# Altium footprint library Terminal_Blocks_Pluggable PCB_5.08mm.PcbLib: 299 footprints (part 9 of 19)
Each footprint in its own frame and in the unit in brackets; x right, y up, seen from the top. Pads: shape width x height; smd on the part's side, far side on the other; paste and mask are expansions set on the pad; w line width, h text height; cw(c..) or ccw(c..) is an arc to the next point about the centre after c.
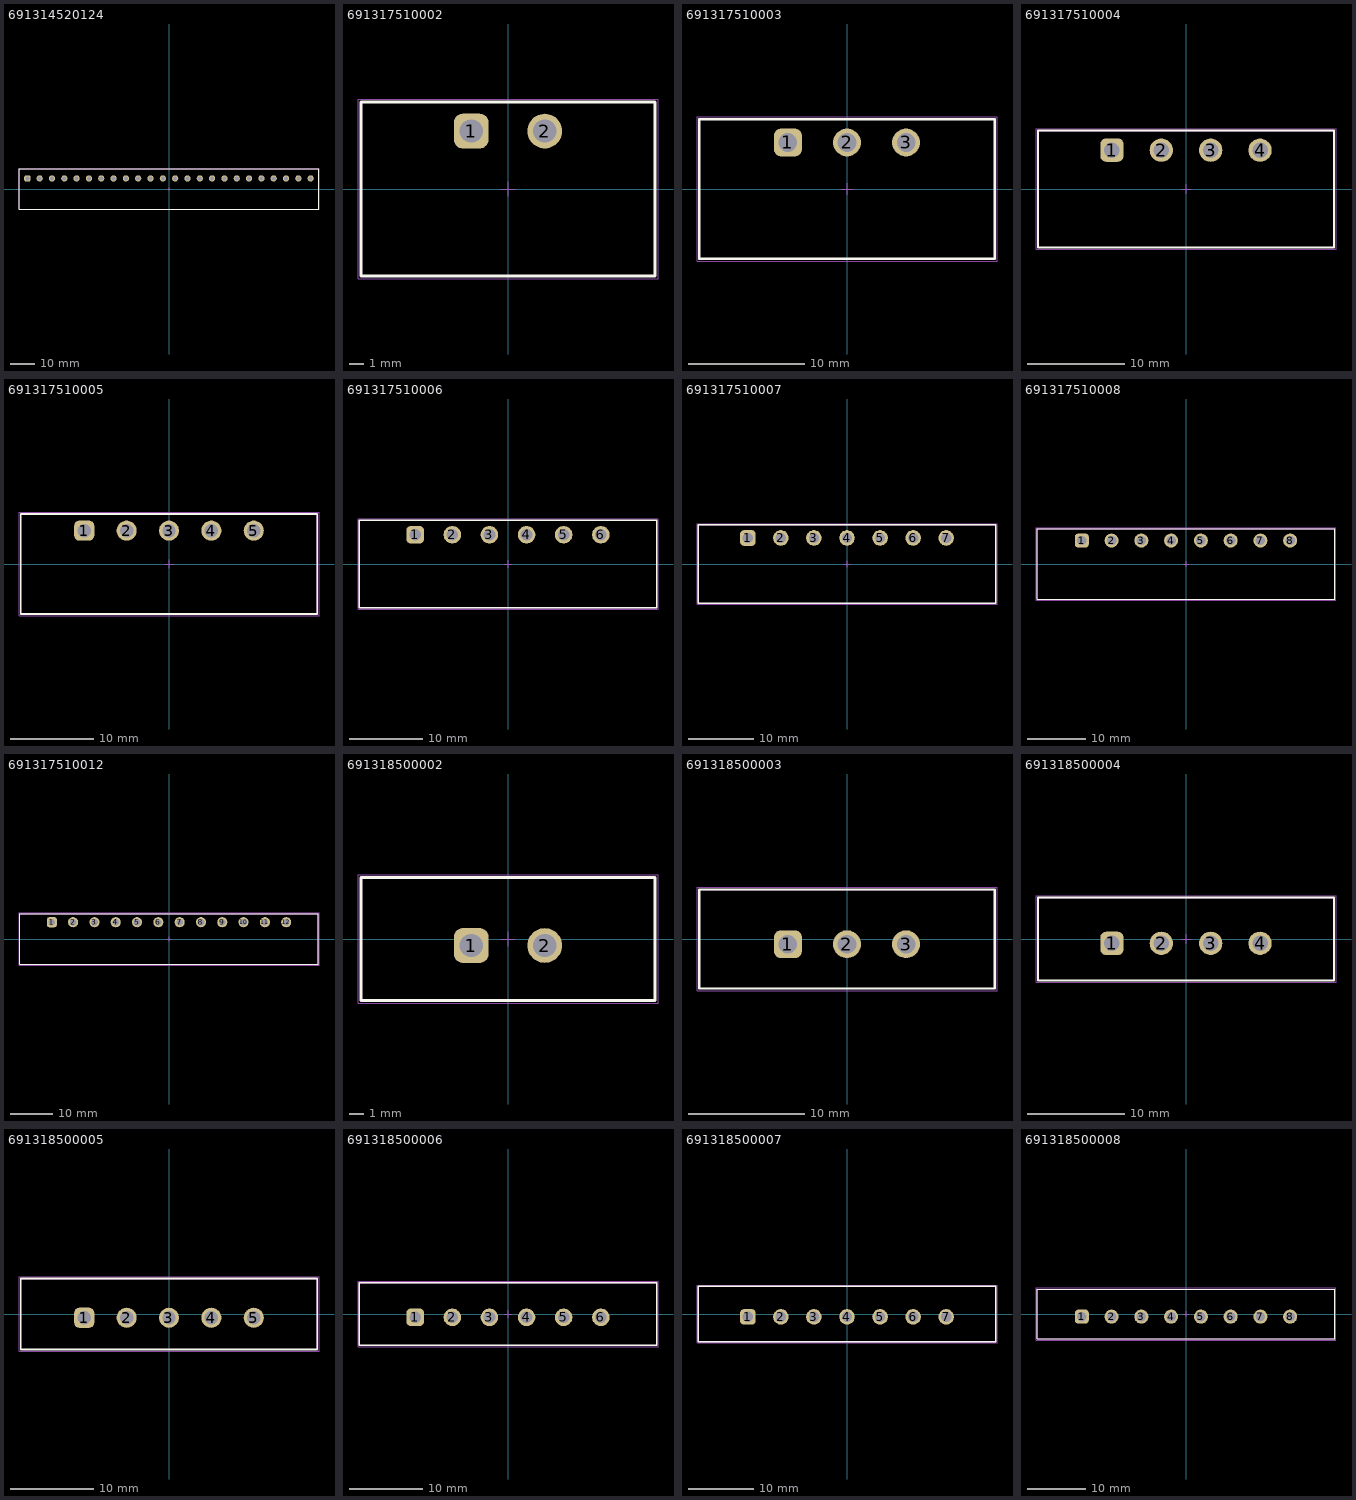
[diagram p8: the footprints below, top view; thin cyan lines are the x and y axes]

## 691314520124 [mm] "5,08mm - PCB Headers - 45¡ã- 24p"
height 14.5
pads (24):
  rrect50% 2.55x2.55 hole 1.7: 1(-58.42,4.35)
  round 2.55 hole 1.7: 2(-53.34,4.35) 3(-48.26,4.35) 4(-43.18,4.35) 5(-38.1,4.35) 6(-33.02,4.35) 7(-27.94,4.35) 8(-22.86,4.35) 9(-17.78,4.35) 10(-12.7,4.35) 11(-7.62,4.35) 12(-2.54,4.35) 13(2.54,4.35) 14(7.62,4.35) 15(12.7,4.35) 16(17.78,4.35) 17(22.86,4.35) 18(27.94,4.35) 19(33.02,4.35) 20(38.1,4.35) 21(43.18,4.35) 22(48.26,4.35) 23(53.34,4.35) 24(58.42,4.35)
Top Overlay:
  lines w0.2: -61.66,-8.25 61.66,-8.25 61.66,8.25 -61.66,8.25 -61.66,-8.25
Top Designator:
  text ".Designator" at -7.498,-0.5 h1.5
Top Component Outline:
  lines w0.1: -61.66,-8.25 -61.66,8.25 61.66,8.25 61.66,-8.25 -61.66,-8.25
Top 3D Body:
  lines w0.1: -61.66,-8.25 61.66,-8.25 61.66,8.25 -61.66,8.25 -61.66,-8.25
Top Courtyard:
  lines w0.05: -61.86,-8.45 -61.86,8.45 61.86,8.45 61.86,-8.45 -61.86,-8.45
Top Component Center:
  lines w0.05: -0.5,0 0.5,0 ; 0,-0.5 0,0.5
3D body "691314520124.stp": height 14.55, standoff -4.05, extent -61.66,-8.25 61.66,8.25

## 691317510002 [mm] "5,08mm - PCB Horizontal Closed With flanges - 02p"
height 8.5
pads (2):
  rrect50% 2.4x2.4 hole 1.6: 1(-2.54,4)
  round 2.4 hole 1.6: 2(2.54,4)
Top Overlay:
  lines w0.2: -10.16,-6 -10.16,6 10.16,6 10.16,-6 -10.16,-6
Top Designator:
  text ".Designator" at -7.498,-0.5 h1.5
Top Component Outline:
  lines w0.1: -10.16,-6 10.16,-6 10.16,6 -10.16,6 -10.16,-6
Top 3D Body:
  lines w0.1: -10.16,-6 -10.16,6 10.16,6 10.16,-6 -10.16,-6
Top Courtyard:
  lines w0.05: -10.36,-6.2 10.36,-6.2 10.36,6.2 -10.36,6.2 -10.36,-6.2
Top Component Center:
  lines w0.05: -0.5,0 0.5,0 ; 0,-0.5 0,0.5
3D body "691317510002.stp": height 8.55, standoff -3.45, extent -10.16,-6 10.16,6

## 691317510003 [mm] "5,08mm - PCB Horizontal Closed With flanges - 03p"
height 8.5
pads (3):
  rrect50% 2.4x2.4 hole 1.6: 1(-5.08,4)
  round 2.4 hole 1.6: 2(0,4) 3(5.08,4)
Top Overlay:
  lines w0.2: -12.7,-6 -12.7,6 12.7,6 12.7,-6 -12.7,-6
Top Designator:
  text ".Designator" at -7.498,-0.5 h1.5
Top Component Outline:
  lines w0.1: -12.7,-6 12.7,-6 12.7,6 -12.7,6 -12.7,-6
Top 3D Body:
  lines w0.1: -12.7,-6 -12.7,6 12.7,6 12.7,-6 -12.7,-6
Top Courtyard:
  lines w0.05: -12.9,-6.2 12.9,-6.2 12.9,6.2 -12.9,6.2 -12.9,-6.2
Top Component Center:
  lines w0.05: -0.5,0 0.5,0 ; 0,-0.5 0,0.5
3D body "691317510003.stp": height 8.55, standoff -3.45, extent -12.7,-6 12.7,6

## 691317510004 [mm] "5,08mm - PCB Horizontal Closed With flanges - 04p"
height 8.5
pads (4):
  rrect50% 2.4x2.4 hole 1.6: 1(-7.62,4)
  round 2.4 hole 1.6: 2(-2.54,4) 3(2.54,4) 4(7.62,4)
Top Overlay:
  lines w0.2: -15.24,-6 15.24,-6 15.24,6 -15.24,6 -15.24,-6
Top Designator:
  text ".Designator" at -7.498,-0.5 h1.5
Top Component Outline:
  lines w0.1: -15.24,-6 -15.24,6 15.24,6 15.24,-6 -15.24,-6
Top 3D Body:
  lines w0.1: -15.24,-6 15.24,-6 15.24,6 -15.24,6 -15.24,-6
Top Courtyard:
  lines w0.05: -15.44,-6.2 -15.44,6.2 15.44,6.2 15.44,-6.2 -15.44,-6.2
Top Component Center:
  lines w0.05: -0.5,0 0.5,0 ; 0,-0.5 0,0.5
3D body "691317510004.stp": height 8.55, standoff -3.45, extent -15.24,-6 15.24,6

## 691317510005 [mm] "5,08mm - PCB Horizontal Closed With flanges - 05p"
height 8.5
pads (5):
  rrect50% 2.4x2.4 hole 1.6: 1(-10.16,4)
  round 2.4 hole 1.6: 2(-5.08,4) 3(0,4) 4(5.08,4) 5(10.16,4)
Top Overlay:
  lines w0.2: -17.78,-6 -17.78,6 17.78,6 17.78,-6 -17.78,-6
Top Designator:
  text ".Designator" at -7.498,-0.5 h1.5
Top Component Outline:
  lines w0.1: -17.78,-6 17.78,-6 17.78,6 -17.78,6 -17.78,-6
Top 3D Body:
  lines w0.1: -17.78,-6 -17.78,6 17.78,6 17.78,-6 -17.78,-6
Top Courtyard:
  lines w0.05: -17.98,-6.2 17.98,-6.2 17.98,6.2 -17.98,6.2 -17.98,-6.2
Top Component Center:
  lines w0.05: -0.5,0 0.5,0 ; 0,-0.5 0,0.5
3D body "691317510005.stp": height 8.55, standoff -3.45, extent -17.78,-6 17.78,6

## 691317510006 [mm] "5,08mm - PCB Horizontal Closed With flanges - 06p"
height 8.5
pads (6):
  rrect50% 2.4x2.4 hole 1.6: 1(-12.7,4)
  round 2.4 hole 1.6: 2(-7.62,4) 3(-2.54,4) 4(2.54,4) 5(7.62,4) 6(12.7,4)
Top Overlay:
  lines w0.2: -20.32,-6 -20.32,6 20.32,6 20.32,-6 -20.32,-6
Top Designator:
  text ".Designator" at -7.498,-0.5 h1.5
Top Component Outline:
  lines w0.1: -20.32,-6 20.32,-6 20.32,6 -20.32,6 -20.32,-6
Top 3D Body:
  lines w0.1: -20.32,-6 -20.32,6 20.32,6 20.32,-6 -20.32,-6
Top Courtyard:
  lines w0.05: -20.52,-6.2 20.52,-6.2 20.52,6.2 -20.52,6.2 -20.52,-6.2
Top Component Center:
  lines w0.05: -0.5,0 0.5,0 ; 0,-0.5 0,0.5
3D body "691317510006.stp": height 8.55, standoff -3.45, extent -20.32,-6 20.32,6

## 691317510007 [mm] "5,08mm - PCB Horizontal Closed With flanges - 07p"
height 8.5
pads (7):
  rrect50% 2.4x2.4 hole 1.6: 1(-15.24,4)
  round 2.4 hole 1.6: 2(-10.16,4) 3(-5.08,4) 4(0,4) 5(5.08,4) 6(10.16,4) 7(15.24,4)
Top Overlay:
  lines w0.2: -22.86,-6 -22.86,6 22.86,6 22.86,-6 -22.86,-6
Top Designator:
  text ".Designator" at -7.498,-0.5 h1.5
Top Component Outline:
  lines w0.1: -22.86,-6 22.86,-6 22.86,6 -22.86,6 -22.86,-6
Top 3D Body:
  lines w0.1: -22.86,-6 -22.86,6 22.86,6 22.86,-6 -22.86,-6
Top Courtyard:
  lines w0.05: -23.06,-6.2 23.06,-6.2 23.06,6.2 -23.06,6.2 -23.06,-6.2
Top Component Center:
  lines w0.05: -0.5,0 0.5,0 ; 0,-0.5 0,0.5
3D body "691317510007.stp": height 8.55, standoff -3.45, extent -22.86,-6 22.86,6

## 691317510008 [mm] "5,08mm - PCB Horizontal Closed With flanges - 08p"
height 8.5
pads (8):
  rrect50% 2.4x2.4 hole 1.6: 1(-17.78,4)
  round 2.4 hole 1.6: 2(-12.7,4) 3(-7.62,4) 4(-2.54,4) 5(2.54,4) 6(7.62,4) 7(12.7,4) 8(17.78,4)
Top Overlay:
  lines w0.2: -25.4,-6 25.4,-6 25.4,6 -25.4,6 -25.4,-6
Top Designator:
  text ".Designator" at -7.498,-0.5 h1.5
Top Component Outline:
  lines w0.1: -25.4,-6 -25.4,6 25.4,6 25.4,-6 -25.4,-6
Top 3D Body:
  lines w0.1: -25.4,-6 25.4,-6 25.4,6 -25.4,6 -25.4,-6
Top Courtyard:
  lines w0.05: -25.6,-6.2 -25.6,6.2 25.6,6.2 25.6,-6.2 -25.6,-6.2
Top Component Center:
  lines w0.05: -0.5,0 0.5,0 ; 0,-0.5 0,0.5
3D body "691317510008.stp": height 8.55, standoff -3.45, extent -25.4,-6 25.4,6

## 691317510012 [mm] "5,08mm - PCB Horizontal Closed With flanges - 12p"
height 8.5
pads (12):
  rrect50% 2.4x2.4 hole 1.6: 1(-27.94,4)
  round 2.4 hole 1.6: 2(-22.86,4) 3(-17.78,4) 4(-12.7,4) 5(-7.62,4) 6(-2.54,4) 7(2.54,4) 8(7.62,4) 9(12.7,4) 10(17.78,4) 11(22.86,4) 12(27.94,4)
Top Overlay:
  lines w0.2: -35.56,-6 -35.56,6 35.56,6 35.56,-6 -35.56,-6
Top Designator:
  text ".Designator" at -7.498,-0.5 h1.5
Top Component Outline:
  lines w0.1: -35.56,-6 35.56,-6 35.56,6 -35.56,6 -35.56,-6
Top 3D Body:
  lines w0.1: -35.56,-6 -35.56,6 35.56,6 35.56,-6 -35.56,-6
Top Courtyard:
  lines w0.05: -35.76,-6.2 35.76,-6.2 35.76,6.2 -35.76,6.2 -35.76,-6.2
Top Component Center:
  lines w0.05: -0.5,0 0.5,0 ; 0,-0.5 0,0.5
3D body "691317510012.stp": height 8.55, standoff -3.45, extent -35.56,-6 35.56,6

## 691318500002 [mm] "5,08mm - Closed Vertical PCB Header with Flanges - 02p"
height 12
pads (2):
  rrect50% 2.4x2.4 hole 1.6: 1(-2.54,-0.45)
  round 2.4 hole 1.6: 2(2.54,-0.45)
Top Overlay:
  lines w0.2: -10.16,-4.25 10.16,-4.25 10.16,4.25 -10.16,4.25 -10.16,-4.25
Top Designator:
  text ".Designator" at -7.498,-0.5 h1.5
Top Component Outline:
  lines w0.1: -10.16,-4.25 -10.16,4.25 10.16,4.25 10.16,-4.25 -10.16,-4.25
Top 3D Body:
  lines w0.1: -10.16,-4.25 10.16,-4.25 10.16,4.25 -10.16,4.25 -10.16,-4.25
Top Courtyard:
  lines w0.05: -10.36,-4.45 10.36,-4.45 10.36,4.45 -10.36,4.45 -10.36,-4.45
Top Component Center:
  lines w0.05: -0.5,0 0.5,0 ; 0,-0.5 0,0.5
3D body "691318500002.stp": height 12.05, standoff -3.95, extent -10.16,-4.25 10.16,4.25

## 691318500003 [mm] "5,08mm - Closed Vertical PCB Header with Flanges - 03p"
height 12
pads (3):
  rrect50% 2.4x2.4 hole 1.6: 1(-5.08,-0.45)
  round 2.4 hole 1.6: 2(0,-0.45) 3(5.08,-0.45)
Top Overlay:
  lines w0.2: -12.7,-4.25 12.7,-4.25 12.7,4.25 -12.7,4.25 -12.7,-4.25
Top Designator:
  text ".Designator" at -7.498,-0.5 h1.5
Top Component Outline:
  lines w0.1: -12.7,-4.25 -12.7,4.25 12.7,4.25 12.7,-4.25 -12.7,-4.25
Top 3D Body:
  lines w0.1: -12.7,-4.25 12.7,-4.25 12.7,4.25 -12.7,4.25 -12.7,-4.25
Top Courtyard:
  lines w0.05: -12.9,-4.45 12.9,-4.45 12.9,4.45 -12.9,4.45 -12.9,-4.45
Top Component Center:
  lines w0.05: -0.5,0 0.5,0 ; 0,-0.5 0,0.5
3D body "691318500003.stp": height 12.05, standoff -3.95, extent -12.7,-4.25 12.7,4.25

## 691318500004 [mm] "5,08mm - Closed Vertical PCB Header with Flanges - 04p"
height 12
pads (4):
  rrect50% 2.4x2.4 hole 1.6: 1(-7.62,-0.45)
  round 2.4 hole 1.6: 2(-2.54,-0.45) 3(2.54,-0.45) 4(7.62,-0.45)
Top Overlay:
  lines w0.2: -15.24,-4.25 -15.24,4.25 15.24,4.25 15.24,-4.25 -15.24,-4.25
Top Designator:
  text ".Designator" at -7.498,-0.5 h1.5
Top Component Outline:
  lines w0.1: -15.24,-4.25 15.24,-4.25 15.24,4.25 -15.24,4.25 -15.24,-4.25
Top 3D Body:
  lines w0.1: -15.24,-4.25 -15.24,4.25 15.24,4.25 15.24,-4.25 -15.24,-4.25
Top Courtyard:
  lines w0.05: -15.44,-4.45 -15.44,4.45 15.44,4.45 15.44,-4.45 -15.44,-4.45
Top Component Center:
  lines w0.05: -0.5,0 0.5,0 ; 0,-0.5 0,0.5
3D body "691318500004.stp": height 12.05, standoff -3.95, extent -15.24,-4.25 15.24,4.25

## 691318500005 [mm] "5,08mm - Closed Vertical PCB Header with Flanges - 05p"
height 12
pads (5):
  rrect50% 2.4x2.4 hole 1.6: 1(-10.16,-0.45)
  round 2.4 hole 1.6: 2(-5.08,-0.45) 3(0,-0.45) 4(5.08,-0.45) 5(10.16,-0.45)
Top Overlay:
  lines w0.2: -17.78,-4.25 17.78,-4.25 17.78,4.25 -17.78,4.25 -17.78,-4.25
Top Designator:
  text ".Designator" at -7.498,-0.5 h1.5
Top Component Outline:
  lines w0.1: -17.78,-4.25 -17.78,4.25 17.78,4.25 17.78,-4.25 -17.78,-4.25
Top 3D Body:
  lines w0.1: -17.78,-4.25 17.78,-4.25 17.78,4.25 -17.78,4.25 -17.78,-4.25
Top Courtyard:
  lines w0.05: -17.98,-4.45 17.98,-4.45 17.98,4.45 -17.98,4.45 -17.98,-4.45
Top Component Center:
  lines w0.05: -0.5,0 0.5,0 ; 0,-0.5 0,0.5
3D body "691318500005.stp": height 12.05, standoff -3.95, extent -17.78,-4.25 17.78,4.25

## 691318500006 [mm] "5,08mm - Closed Vertical PCB Header with Flanges - 06p"
height 12
pads (6):
  rrect50% 2.4x2.4 hole 1.6: 1(-12.7,-0.45)
  round 2.4 hole 1.6: 2(-7.62,-0.45) 3(-2.54,-0.45) 4(2.54,-0.45) 5(7.62,-0.45) 6(12.7,-0.45)
Top Overlay:
  lines w0.2: -20.32,-4.25 -20.32,4.25 20.32,4.25 20.32,-4.25 -20.32,-4.25
Top Designator:
  text ".Designator" at -7.498,-0.5 h1.5
Top Component Outline:
  lines w0.1: -20.32,-4.25 20.32,-4.25 20.32,4.25 -20.32,4.25 -20.32,-4.25
Top 3D Body:
  lines w0.1: -20.32,-4.25 -20.32,4.25 20.32,4.25 20.32,-4.25 -20.32,-4.25
Top Courtyard:
  lines w0.05: -20.52,-4.45 -20.52,4.45 20.52,4.45 20.52,-4.45 -20.52,-4.45
Top Component Center:
  lines w0.05: -0.5,0 0.5,0 ; 0,-0.5 0,0.5
3D body "691318500006.stp": height 12.05, standoff -3.95, extent -20.32,-4.25 20.32,4.25

## 691318500007 [mm] "5,08mm - Closed Vertical PCB Header with Flanges - 07p"
height 12
pads (7):
  rrect50% 2.4x2.4 hole 1.6: 1(-15.24,-0.45)
  round 2.4 hole 1.6: 2(-10.16,-0.45) 3(-5.08,-0.45) 4(0,-0.45) 5(5.08,-0.45) 6(10.16,-0.45) 7(15.24,-0.45)
Top Overlay:
  lines w0.2: -22.86,-4.25 -22.86,4.25 22.86,4.25 22.86,-4.25 -22.86,-4.25
Top Designator:
  text ".Designator" at -7.498,-0.5 h1.5
Top Component Outline:
  lines w0.1: -22.86,-4.25 22.86,-4.25 22.86,4.25 -22.86,4.25 -22.86,-4.25
Top 3D Body:
  lines w0.1: -22.86,-4.25 -22.86,4.25 22.86,4.25 22.86,-4.25 -22.86,-4.25
Top Courtyard:
  lines w0.05: -23.06,-4.45 -23.06,4.45 23.06,4.45 23.06,-4.45 -23.06,-4.45
Top Component Center:
  lines w0.05: -0.5,0 0.5,0 ; 0,-0.5 0,0.5
3D body "691318500007.stp": height 12.05, standoff -3.95, extent -22.86,-4.25 22.86,4.25

## 691318500008 [mm] "5,08mm - Closed Vertical PCB Header with Flanges - 08p"
height 12
pads (8):
  rrect50% 2.4x2.4 hole 1.6: 1(-17.78,-0.45)
  round 2.4 hole 1.6: 2(-12.7,-0.45) 3(-7.62,-0.45) 4(-2.54,-0.45) 5(2.54,-0.45) 6(7.62,-0.45) 7(12.7,-0.45) 8(17.78,-0.45)
Top Overlay:
  lines w0.2: -25.4,-4.25 25.4,-4.25 25.4,4.25 -25.4,4.25 -25.4,-4.25
Top Designator:
  text ".Designator" at -7.498,-0.5 h1.5
Top Component Outline:
  lines w0.1: -25.4,-4.25 -25.4,4.25 25.4,4.25 25.4,-4.25 -25.4,-4.25
Top 3D Body:
  lines w0.1: -25.4,-4.25 25.4,-4.25 25.4,4.25 -25.4,4.25 -25.4,-4.25
Top Courtyard:
  lines w0.05: -25.6,-4.45 25.6,-4.45 25.6,4.45 -25.6,4.45 -25.6,-4.45
Top Component Center:
  lines w0.05: -0.5,0 0.5,0 ; 0,-0.5 0,0.5
3D body "691318500008.stp": height 12.05, standoff -3.95, extent -25.4,-4.25 25.4,4.25